# Altium footprint library 跳线排针1×2.PcbLib: 1 footprints
Each footprint in its own frame and in the unit in brackets; x right, y up, seen from the top. Pads: shape width x height; smd on the part's side, far side on the other; paste and mask are expansions set on the pad; w line width, h text height; cw(c..) or ccw(c..) is an arc to the next point about the centre after c.
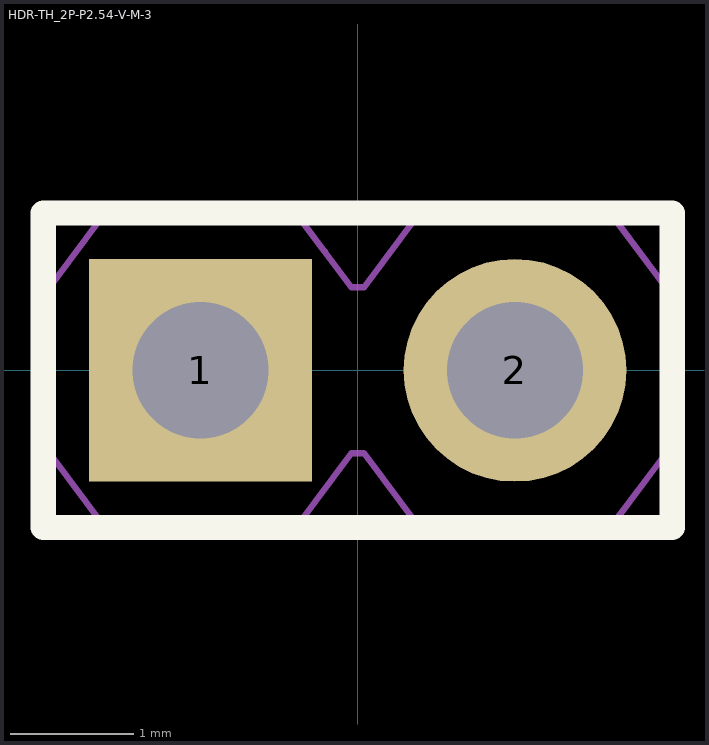
[diagram p0: the footprint, top view; thin cyan lines are the x and y axes]

## HDR-TH_2P-P2.54-V-M-3 [mm]
pads (2):
  rect 1.8x1.8 hole 1.1: 1(-1.27,0)
  round 1.8 hole 1.1: 2(1.27,0)
Top Overlay:
  lines w0.203: -2.54,-1.27 -2.54,1.27 -0.635,1.27 2.54,1.27 2.54,-1.27 -2.54,-1.27
Mechanical 6:
  lines w0.051: -2.54,-0.67 -2.54,0.67 -2.49,0.67 -2.04,1.27 -0.501,1.27 -0.267,0.961 -0.05,0.67 0.051,0.67 0.5,1.27 2.04,1.27 2.49,0.67 2.54,0.67 2.54,-0.67 2.49,-0.67 2.04,-1.27 0.5,-1.27 0.05,-0.67 -0.05,-0.67 -0.5,-1.27 -2.04,-1.27 -2.49,-0.67 -2.54,-0.67
Mechanical 8:
  region: -2.48,-1.27 -2.48,-1.295 -2.515,-1.33 -2.565,-1.33 -2.6,-1.295 -2.6,-1.27 -2.6,-1.245 -2.565,-1.21 -2.515,-1.21 -2.48,-1.245 -2.48,-1.27
Mechanical 9:
  region: 1.59,0 1.59,-0.064 1.541,-0.181 1.451,-0.271 1.334,-0.32 1.206,-0.32 1.089,-0.271 0.999,-0.181 0.95,-0.064 0.95,0 0.95,0.064 0.999,0.181 1.089,0.271 1.206,0.32 1.334,0.32 1.451,0.271 1.541,0.181 1.59,0.064 1.59,0
  region: -0.95,0 -0.95,-0.064 -0.999,-0.181 -1.089,-0.271 -1.206,-0.32 -1.334,-0.32 -1.451,-0.271 -1.541,-0.181 -1.59,-0.064 -1.59,0 -1.59,0.064 -1.541,0.181 -1.451,0.271 -1.334,0.32 -1.206,0.32 -1.089,0.271 -0.999,0.181 -0.95,0.064 -0.95,0